# Altium schematic symbol library Schlib1.SchLib: 4 symbols
Pins are listed as number, name and electrical type; pins without a type are passive.

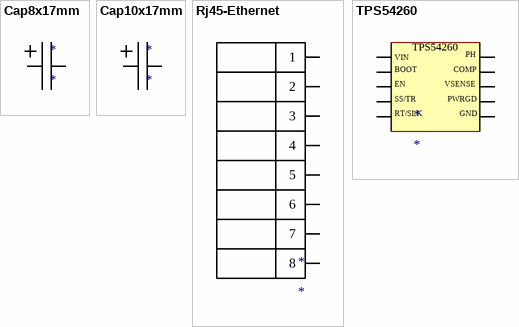
[diagram p0: symbols Cap8x17mm to TPS54260]

## Cap8x17mm
designator *
footprint cap8x17mm
pins: 1, 2

## Cap10x17mm
designator *
footprint Cap10x17mm
pins: 1, 2

## Rj45-Ethernet
designator *
footprint Rj45_Ethernet
pins: 1, 2, 3, 4, 5, 6, 7, 8

## TPS54260
designator *
footprint TSSOP50P490X110-10N (TSSOP, 10-Leads, Body 3,00x3,00mm, Pitch 0,50mm, IPC Medium Density)
pins: 1, 2, 3, 4, 5, 6 76, 7 76, 8 76, 9, 10
text: VIN; PH; BOOT; COMP; EN; VSENSE; SS/TR; PWRGD; RT/SLK; GND